# Altium schematic symbol library SXLP-450+.SchLib: 1 symbol
Pins are listed as number, name and electrical type; pins without a type are passive.

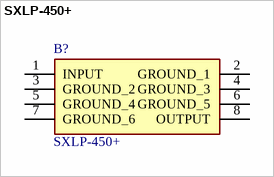
[diagram p0: symbol SXLP-450+]

## SXLP-450+
designator B?
465MHz (Cutoff) Frequency Low Pass RF Filter (Radio Frequency) Bandwidth 2.5dB 8-SMD, No Lead; Manufacturer_Name: Mini-Circuits; Geometry.Height: 6.86mm; Mouser Part Number: *; Mouser Price/Stock: *; Manufacturer_Part_Number: SXLP-450+; Datasheet Link: https://www.minicircuits.com/pdfs/SXLP-450+.pdf?srsltid=AfmBOopyfng1W_JE_YCYT7VOxU4Z8bevNLx0xfxbggheauuZmJBv02wv
footprint SXLP450
pins: 1 INPUT, 2 GROUND_1, 3 GROUND_2, 4 GROUND_3, 5 GROUND_4, 6 GROUND_5, 7 GROUND_6, 8 OUTPUT